# Altium footprint library Controlador_BombaDeAgua(analogico).PcbLib: 9 footprints
Each footprint in its own frame and in the unit in brackets; x right, y up, seen from the top. Pads: shape width x height; smd on the part's side, far side on the other; paste and mask are expansions set on the pad; w line width, h text height; cw(c..) or ccw(c..) is an arc to the next point about the centre after c.
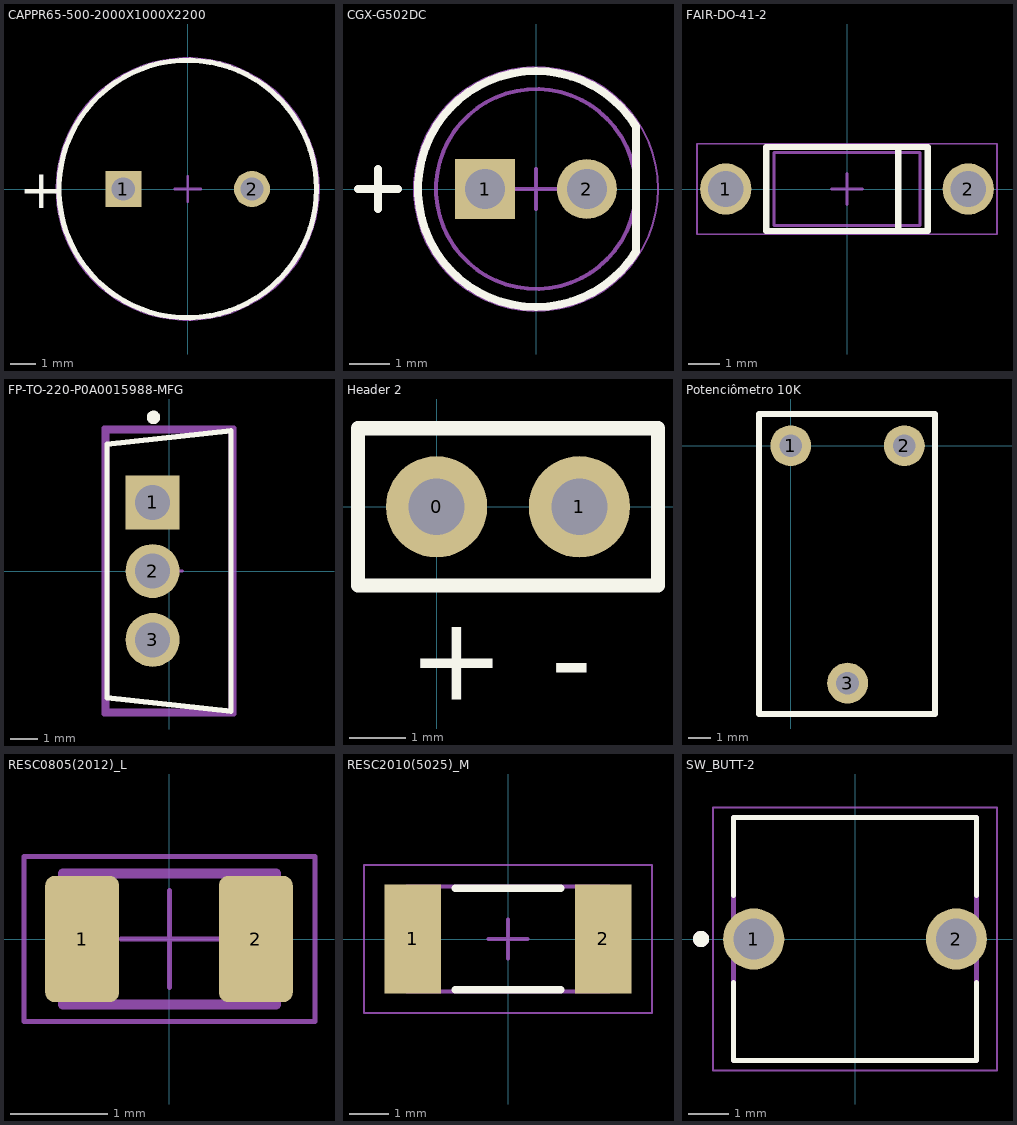
[diagram p0: the footprints below, top view; thin cyan lines are the x and y axes]

## CAPPR65-500-2000X1000X2200 [mm] "THD, 2-Leads, Dia 10mm, Pin Spacing 5mm"
height 22
pads (2):
  rect 1.4x1.4 hole 0.9: 1(-2.5,0)
  round 1.4 hole 0.9: 2(2.5,0)
Top Overlay:
  circle w0.2: c0,0 r5
  text "+" at -6.55,-0.75 h1.5
Mechanical 13:
  circle w0.1: c0,0 r5
Mechanical 15:
  circle w0.05: c0,0 r5.1
  lines w0.1: -0.5,0 0.5,0 ; 0,-0.5 0,0.5
3D body: height 22, standoff 0.05, extent -3.999,-3.999 4,4
3D body: height 21.9, standoff 0.01, extent -4.949,-4.949 4.95,4.95
3D body: height 22, standoff 0, extent -4.999,-4.999 4.622,5
3D body: height 0, standoff -14, extent 2.203,-0.299 2.8,0.3
3D body: height 0, standoff -17, extent -2.797,-0.299 -2.2,0.3

## CGX-G502DC [mm] "THD, 2-Leads, Dia 5.9mm, Pin Spacing 2.54mm"
height 9.1
pads (2):
  rect 1.5x1.5 hole 1: 1(-1.27,0)
  round 1.5 hole 1: 2(1.27,0)
Top Overlay:
  lines w0.2: -4.45,0 -3.45,0 ; -3.95,-0.5 -3.95,0.5 ; 2.5,1.566 ccw(c0,0) 2.5,-1.566 2.5,1.566
Mechanical 13:
  circle w0.1: c0,0 r2.5
  lines w0.1: 2.5,1.566 ccw(c0,0) 2.5,-1.566 2.5,1.566
Mechanical 15:
  circle w0.05: c0,0 r3.05
  lines w0.1: -0.5,0 0.5,0 ; 0,-0.5 0,0.5
3D body: height 0.5, standoff -16.5, extent 1.02,-0.25 1.52,0.25
3D body: height 0.5, standoff -18.5, extent -1.52,-0.25 -1.02,0.25
3D body: height 1.5, standoff 0.5, extent -2.95,-2.95 2.5,2.95
3D body: height 6.6, standoff 1.5, extent -2.5,-2.497 2.5,2.497
3D body: height 9.1, standoff 4.1, extent -2.489,-2.497 2.5,2.497

## FAIR-DO-41-2 [mm] "THD, 2-Leads, Body 5.2x2.72mm, Pin Spacing 7.8mm"
height 2.72
pads (2):
  round 1.65 hole 1.15: 1(-3.9,0) 2(3.9,0)
Top Overlay:
  lines w0.2: 1.651,-1.35 1.651,1.35 ; -2.6,-1.35 2.6,-1.35 2.6,1.35 -2.6,1.35 -2.6,-1.35
Mechanical 13:
  lines w0.1: -2.35,-1.174 2.35,-1.174 2.35,1.174 -2.35,1.174 -2.35,-1.174
Mechanical 15:
  lines w0.05: -4.825,-1.45 4.825,-1.45 4.825,1.45 -4.825,1.45 -4.825,-1.45
  lines w0.1: -0.5,0 0.5,0 ; 0,-0.5 0,0.5
3D body: height 2.35, standoff 0, extent -2.35,-1.174 2.35,1.174
3D body: height 1.57, standoff 0.78, extent 2.35,-0.392 3.9,0.392
3D body: height 1.17, standoff -2, extent 3.507,-0.392 4.292,0.393
3D body: height 1.57, standoff 0.78, extent 3.508,-0.392 4.292,0.393
3D body: height 1.57, standoff 0.78, extent -4.292,-0.392 -3.507,0.392
3D body: height 1.17, standoff -2, extent -4.292,-0.392 -3.507,0.393
3D body: height 1.57, standoff 0.78, extent -3.899,-0.392 -2.349,0.392

## FP-TO-220-P0A0015988-MFG [mm]
height 1.45
pads (3):
  rect 2x2 hole 1.3 paste-2539.97 mask+0: 1(-0.607,2.55)
  round 2 hole 1.3 paste-2539.97 mask+0: 2(-0.607,0) 3(-0.607,-2.55)
Top Overlay:
  circle w0.25: c-0.575,5.7 r0.125
  lines w0.2: -2.3,-4.7 2.3,-5.2 2.3,5.2 -2.3,4.7 -2.3,-4.7
Top Assembly:
  lines w0.2: -2.4,-5.3 2.4,-5.3 2.4,5.3 -2.4,5.3 -2.4,-5.3
  text ".Designator" at 0,-0.001 h1
Top 3D Body:
  lines w0.2: -2.3,-5.2 2.3,-5.2 2.3,5.2 -2.3,5.2 -2.3,-5.2
Top Courtyard:
  lines w0.2: -2.4,-5.3 2.4,-5.3 2.4,5.3 -2.4,5.3 -2.4,-5.3
Top Component Center:
  lines w0.1: -0.5,0 0.5,0 ; 0,-0.5 0,0.5
3D body "Trans_STMicroelectronics_TIP31C_eec.STEP": height 0.25, standoff 0, extent -2.4,-5.3 2.4,5.3

## Header 2 [mm]
height 1.45
pads (2):
  round 1.8 hole 1: 0(0,0) 1(2.54,0)
Top Overlay:
  lines w0.254: -1.397,-1.397 -1.397,1.397 3.937,1.397 3.937,-1.397 -1.397,-1.397
  text "+" at -0.508,-3.429 h1.5
  text "-" at 2.032,-3.429 h1.5
3D body "2-Pin Header - Male - 2.54mm.step": height 8.89, standoff -3.05, extent -1.27,-1.27 3.81,1.27

## Potenciômetro 10K [mm]
height 1.45
pads (3):
  round 1.8 hole 1: 1(0,0) 2(5,0) 3(2.5,-10.452)
Top Overlay:
  lines w0.254: -1.397,-11.811 6.35,-11.811 6.35,1.397 -1.397,1.397 -1.397,-11.811
3D body "User Library-3319P-1 Trim pot.step": height 6.55, standoff -3.8, extent -2.032,-10.632 6.968,1.27

## RESC0805(2012)_L [mm] "Chip Resistor, Body 2.0x1.3mm, IPC High Density"
height 0.7
pads (2):
  rrect25% 0.76x1.3 smd: 1(-0.9,0) 2(0.89,0)
Top Assembly:
  lines w0.1: -1.1,-0.675 1.1,-0.675 1.1,0.675 -1.1,0.675 -1.1,-0.675
Top Courtyard:
  lines w0.05: -0.5,0 0.5,0 ; 0,-0.5 0,0.5 ; -1.5,-0.85 1.5,-0.85 1.5,0.85 -1.5,0.85 -1.5,-0.85
Top Designator:
  text ".Designator" at -1.27,-0.127 h0.6
3D body "RES0805.step": height 0.6, standoff 0, extent -1,-0.625 1,0.625

## RESC2010(5025)_M [mm] "Chip Resistor, Body 5.0x2.5mm, IPC Low Density"
height 0.71
pads (2):
  rect 1.45x2.8 smd: 1(-2.45,0) 2(2.45,0)
Top Overlay:
  lines w0.2: -1.35,-1.3 1.35,-1.3 ; -1.35,1.3 1.35,1.3
Mechanical 13:
  lines w0.1: -2.6,-1.35 2.6,-1.35 2.6,1.35 -2.6,1.35 -2.6,-1.35
Mechanical 15:
  lines w0.05: -3.7,-1.9 3.7,-1.9 3.7,1.9 -3.7,1.9 -3.7,-1.9
  lines w0.1: -0.5,0 0.5,0 ; 0,-0.5 0,0.5
3D body: height 0.71, standoff 0, extent 1.98,-1.35 2.6,1.35
3D body: height 0.71, standoff 0, extent -1.98,-1.35 1.98,1.35
3D body: height 0.71, standoff 0, extent -2.6,-1.35 -1.98,1.35

## SW_BUTT-2 [mm]
height 9.5
pads (2):
  round 1.508 hole 1: 1(-2.5,0) 2(2.5,0)
Top Overlay:
  circle w0.2: c-3.8,0 r0.1
  lines w0.127: -3,-1.075 -3,-3 3,-3 3,-1.075 ; -3,1.075 -3,3 3,3 3,1.075
Top Assembly:
  circle w0.2: c-3.8,0 r0.1
  lines w0.127: -3,-3 3,-3 3,3 -3,3 -3,-3
Top Courtyard:
  lines w0.05: -3.504,-3.25 -3.504,3.25 3.504,3.25 3.504,-3.25 -3.504,-3.25